# Altium integrated library conn_wire2board.IntLib: 234 symbols (part 2 of 2)
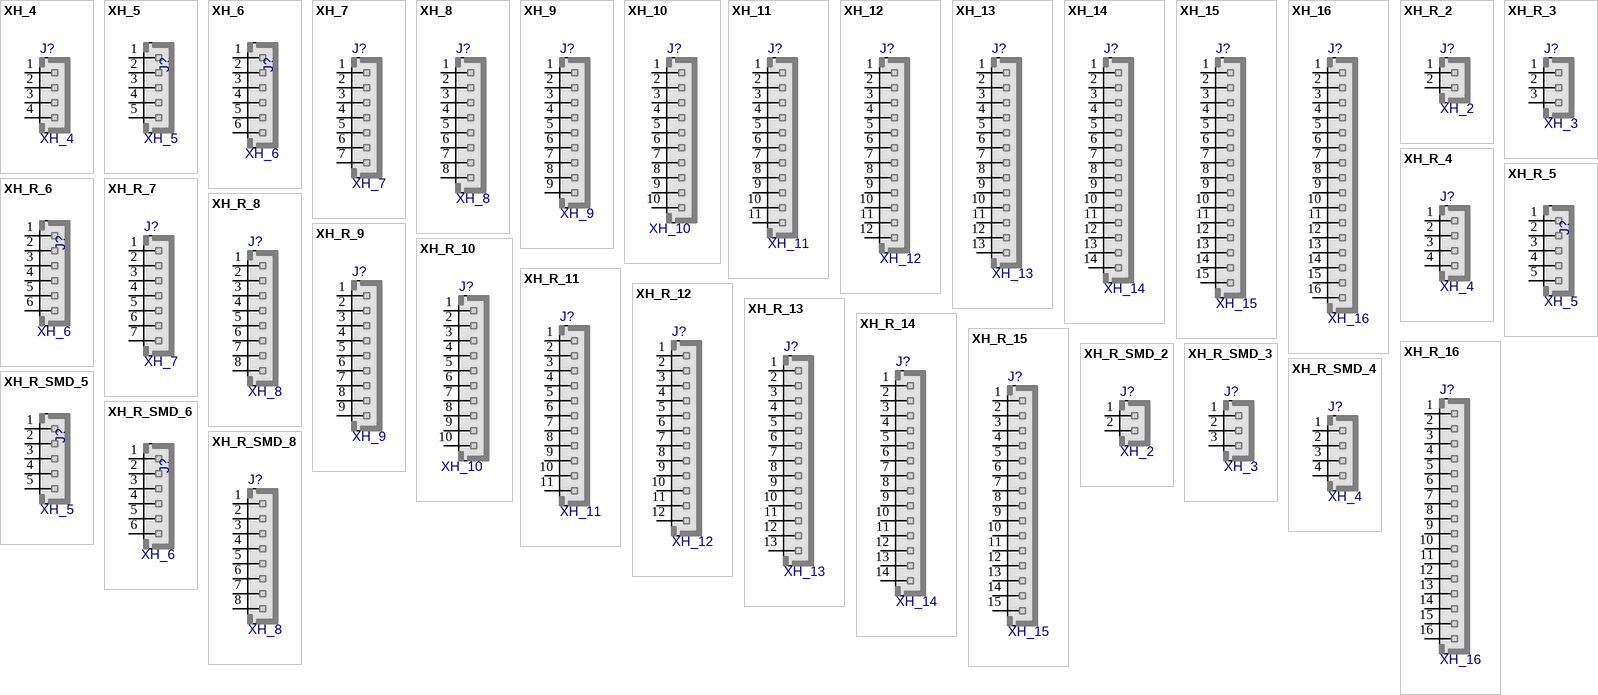
[diagram p6: symbols XH_4 to XH_R_SMD_8]

## XH_9
designator J?
PW10-x-M, JST-BxB-XH-A pitch: 2.5mm, 3A/250v; MANF: JST; MANF_P#: B9B-XH-A; PARAM2: 250v; PARAM: 3.0A; VALUE: XH_9
footprint XH_9 (PW10-xx-M, JST-BxB-XH-A pitch: 2.5mm)
pins: 1, 2, 3, 4, 5, 6, 7, 8, 9

## XH_10
designator J?
PW10-x-M, JST-BxB-XH-A pitch: 2.5mm, 3A/250v; MANF: JST; MANF_P#: B10B-XH-A; PARAM2: 250v; PARAM: 3.0A; VALUE: XH_10
footprint XH_10 (PW10-xx-M, JST-BxB-XH-A pitch: 2.5mm)
pins: 1, 2, 3, 4, 5, 6, 7, 8, 9, 10

## XH_11
designator J?
PW10-x-M, JST-BxB-XH-A pitch: 2.5mm, 3A/250v; MANF: JST; MANF_P#: B11B-XH-A; PARAM2: 250v; PARAM: 3.0A; VALUE: XH_11
footprint XH_11 (PW10-x-M, JST-BxB-XH-A pitch: 2.5mm, 3A/250v)
pins: 1, 2, 3, 4, 5, 6, 7, 8, 9, 10, 11

## XH_12
designator J?
PW10-x-M, JST-BxB-XH-A pitch: 2.5mm, 3A/250v; MANF: JST; MANF_P#: B12B-XH-A; PARAM2: 250v; PARAM: 3.0A; VALUE: XH_12
footprint XH_12 (PW10-x-M, JST-BxB-XH-A pitch: 2.5mm, 3A/250v)
pins: 1, 2, 3, 4, 5, 6, 7, 8, 9, 10, 11, 12

## XH_13
designator J?
PW10-x-M, JST-BxB-XH-A pitch: 2.5mm, 3A/250v; MANF: JST; MANF_P#: B13B-XH-A; PARAM2: 250v; PARAM: 3.0A; VALUE: XH_13
footprint XH_13 (PW10-x-M, JST-BxB-XH-A pitch: 2.5mm, 3A/250v)
pins: 1, 2, 3, 4, 5, 6, 7, 8, 9, 10, 11, 12, 13

## XH_14
designator J?
PW10-x-M, JST-BxB-XH-A pitch: 2.5mm, 3A/250v; MANF: JST; MANF_P#: B14B-XH-A; PARAM2: 250v; PARAM: 3.0A; VALUE: XH_14
footprint XH_14 (PW10-x-M, JST-BxB-XH-A pitch: 2.5mm, 3A/250v)
pins: 1, 2, 3, 4, 5, 6, 7, 8, 9, 10, 11, 12, 13, 14

## XH_15
designator J?
PW10-x-M, JST-BxB-XH-A pitch: 2.5mm, 3A/250v; MANF: JST; MANF_P#: B15B-XH-A; PARAM2: 250v; PARAM: 3.0A; VALUE: XH_15
footprint XH_15 (PW10-x-M, JST-BxB-XH-A pitch: 2.5mm, 3A/250v)
pins: 1, 2, 3, 4, 5, 6, 7, 8, 9, 10, 11, 12, 13, 14, 15

## XH_16
designator J?
PW10-x-M, JST-BxB-XH-A pitch: 2.5mm, 3A/250v; MANF: JST; MANF_P#: B16B-XH-A; PARAM2: 250v; PARAM: 3.0A; VALUE: XH_16
footprint XH_16 (PW10-x-M, JST-BxB-XH-A pitch: 2.5mm, 3A/250v)
pins: 1, 2, 3, 4, 5, 6, 7, 8, 9, 10, 11, 12, 13, 14, 15, 16

## XH_R_2
designator J?, comment XH_2
JST-SxB-XH-A pitch: 2.5mm, 3A/250v; MANF: JST; MANF_P#: S2B-XH-A; PARAM2: 250v; PARAM: 3.0A; VALUE: XH_2
footprint XH_R_2 (JST-SxB-XH-A pitch: 2.5mm, 3A/250v, Righ Angle (Side Entry))
pins: 1, 2

## XH_R_3
designator J?, comment XH_3
JST-SxB-XH-A pitch: 2.5mm, 3A/250v; MANF: JST; MANF_P#: S3B-XH-A; PARAM2: 250v; PARAM: 3.0A; VALUE: XH_3
footprint XH_R_3 (JST-SxB-XH-A pitch: 2.5mm, 3A/250v, Righ Angle (Side Entry))
pins: 1, 2, 3

## XH_R_4
designator J?, comment XH_4
JST-SxB-XH-A pitch: 2.5mm, 3A/250v; MANF: JST; MANF_P#: S4B-XH-A; PARAM2: 250v; PARAM: 3.0A; VALUE: XH_4
footprint XH_R_4 (JST-SxB-XH-A pitch: 2.5mm, 3A/250v, Righ Angle (Side Entry))
pins: 1, 2, 3, 4

## XH_R_5
designator J?, comment XH_5
JST-SxB-XH-A pitch: 2.5mm, 3A/250v; MANF: JST; PARAM2: 250v; PARAM: 3.0A; MANF_P#: S5B-XH-A; VALUE: XH_5
footprint XH_R_5 (JST-SxB-XH-A pitch: 2.5mm, 3A/250v, Righ Angle (Side Entry))
pins: 1, 2, 3, 4, 5

## XH_R_6
designator J?, comment XH_6
JST-SxB-XH-A pitch: 2.5mm, 3A/250v; MANF: JST; PARAM2: 250v; PARAM: 3.0A; MANF_P#: S6B-XH-A; VALUE: XH_6
footprint XH_R_6 (JST-SxB-XH-A pitch: 2.5mm, 3A/250v, Righ Angle (Side Entry))
pins: 1, 2, 3, 4, 5, 6

## XH_R_7
designator J?, comment XH_7
JST-SxB-XH-A pitch: 2.5mm, 3A/250v; MANF: JST; MANF_P#: S7B-XH-A; PARAM2: 250v; PARAM: 3.0A; VALUE: XH_7
footprint XH_R_7 (JST-SxB-XH-A pitch: 2.5mm, 3A/250v, Righ Angle (Side Entry))
pins: 1, 2, 3, 4, 5, 6, 7

## XH_R_8
designator J?, comment XH_8
JST-SxB-XH-A pitch: 2.5mm, 3A/250v; MANF: JST; MANF_P#: S8B-XH-A; PARAM2: 250v; PARAM: 3.0A; VALUE: XH_8
footprint XH_R_8 (JST-SxB-XH-A pitch: 2.5mm, 3A/250v, Righ Angle (Side Entry))
pins: 1, 2, 3, 4, 5, 6, 7, 8

## XH_R_9
designator J?, comment XH_9
JST-SxB-XH-A pitch: 2.5mm, 3A/250v; MANF: JST; MANF_P#: S9B-XH-A; PARAM2: 250v; PARAM: 3.0A; VALUE: XH_9
footprint XH_R_9 (JST-SxB-XH-A pitch: 2.5mm, 3A/250v, Righ Angle (Side Entry))
pins: 1, 2, 3, 4, 5, 6, 7, 8, 9

## XH_R_10
designator J?, comment XH_10
JST-SxB-XH-A pitch: 2.5mm, 3A/250v; MANF: JST; MANF_P#: S10B-XH-A; PARAM2: 250v; PARAM: 3.0A; VALUE: XH_10
footprint XH_R_10 (JST-SxB-XH-A pitch: 2.5mm, 3A/250v, Righ Angle (Side Entry))
pins: 1, 2, 3, 4, 5, 6, 7, 8, 9, 10

## XH_R_11
designator J?, comment XH_11
JST-SxB-XH-A pitch: 2.5mm, 3A/250v; MANF: JST; MANF_P#: S11B-XH-A; PARAM2: 250v; PARAM: 3.0A; VALUE: XH_11
footprint XH_R_11 (JST-SxB-XH-A pitch: 2.5mm, 3A/250v, Righ Angle (Side Entry))
pins: 1, 2, 3, 4, 5, 6, 7, 8, 9, 10, 11

## XH_R_12
designator J?, comment XH_12
JST-SxB-XH-A pitch: 2.5mm, 3A/250v; MANF: JST; MANF_P#: S12B-XH-A; PARAM2: 250v; PARAM: 3.0A; VALUE: XH_12
footprint XH_R_12 (JST-SxB-XH-A pitch: 2.5mm, 3A/250v, Righ Angle (Side Entry))
pins: 1, 2, 3, 4, 5, 6, 7, 8, 9, 10, 11, 12

## XH_R_13
designator J?, comment XH_13
JST-SxB-XH-A pitch: 2.5mm, 3A/250v; MANF: JST; MANF_P#: S13B-XH-A; PARAM2: 250v; PARAM: 3.0A; VALUE: XH_13
footprint XH_R_13 (JST-SxB-XH-A pitch: 2.5mm, 3A/250v, Righ Angle (Side Entry))
pins: 1, 2, 3, 4, 5, 6, 7, 8, 9, 10, 11, 12, 13

## XH_R_14
designator J?, comment XH_14
JST-SxB-XH-A pitch: 2.5mm, 3A/250v; MANF: JST; MANF_P#: S14B-XH-A; PARAM2: 250v; PARAM: 3.0A; VALUE: XH_14
footprint XH_R_14 (JST-SxB-XH-A pitch: 2.5mm, 3A/250v, Righ Angle (Side Entry))
pins: 1, 2, 3, 4, 5, 6, 7, 8, 9, 10, 11, 12, 13, 14

## XH_R_15
designator J?, comment XH_15
JST-SxB-XH-A pitch: 2.5mm, 3A/250v; MANF: JST; MANF_P#: S15B-XH-A; PARAM2: 250v; PARAM: 3.0A; VALUE: XH_15
footprint XH_R_15 (JST-SxB-XH-A pitch: 2.5mm, 3A/250v, Righ Angle (Side Entry))
pins: 1, 2, 3, 4, 5, 6, 7, 8, 9, 10, 11, 12, 13, 14, 15

## XH_R_16
designator J?, comment XH_16
JST-SxB-XH-A pitch: 2.5mm, 3A/250v; MANF: JST; MANF_P#: S16B-XH-A; PARAM2: 250v; PARAM: 3.0A; VALUE: XH_16
footprint XH_R_16 (JST-SxB-XH-A pitch: 2.5mm, 3A/250v, Righ Angle (Side Entry))
pins: 1, 2, 3, 4, 5, 6, 7, 8, 9, 10, 11, 12, 13, 14, 15, 16

## XH_R_SMD_2
designator J?, comment XH_2
JST-SxB-XH-SM4 pitch: 2.5mm, 3A/250v; MANF: JST; MANF_P#: S2B-XH-A; PARAM2: 250v; PARAM: 3.0A; VALUE: XH_2
footprint XH_R_SMD_2 (JST-SxB-XH-SM4-TB pitch: 2.5mm, 3A/250v, Righ Angle (Side Entry), SMD)
pins: 1, 2

## XH_R_SMD_3
designator J?, comment XH_3
JST-SxB-XH-SM4 pitch: 2.5mm, 3A/250v; MANF: JST; MANF_P#: S3B-XH-A; PARAM2: 250v; PARAM: 3.0A; VALUE: XH_3
footprint XH_R_SMD_3 (JST-SxB-XH-SM4-TB pitch: 2.5mm, 3A/250v, Righ Angle (Side Entry), SMD)
pins: 1, 2, 3

## XH_R_SMD_4
designator J?, comment XH_4
JST-SxB-XH-SM4 pitch: 2.5mm, 3A/250v; MANF: JST; MANF_P#: S4B-XH-A; PARAM2: 250v; PARAM: 3.0A; VALUE: XH_4
footprint XH_R_SMD_4 (JST-SxB-XH-SM4-TB pitch: 2.5mm, 3A/250v, Righ Angle (Side Entry), SMD)
pins: 1, 2, 3, 4

## XH_R_SMD_5
designator J?, comment XH_5
JST-SxB-XH-SM4 pitch: 2.5mm, 3A/250v; MANF: JST; PARAM2: 250v; PARAM: 3.0A; MANF_P#: S5B-XH-A; VALUE: XH_5
footprint XH_R_SMD_5 (JST-SxB-XH-SM4-TB pitch: 2.5mm, 3A/250v, Righ Angle (Side Entry), SMD)
pins: 1, 2, 3, 4, 5

## XH_R_SMD_6
designator J?, comment XH_6
JST-SxB-XH-SM4 pitch: 2.5mm, 3A/250v; MANF: JST; PARAM2: 250v; PARAM: 3.0A; MANF_P#: S6B-XH-A; VALUE: XH_6
footprint XH_R_SMD_6 (JST-SxB-XH-SM4-TB pitch: 2.5mm, 3A/250v, Righ Angle (Side Entry), SMD)
pins: 1, 2, 3, 4, 5, 6

## XH_R_SMD_8
designator J?, comment XH_8
JST-SxB-XH-SM4 pitch: 2.5mm, 3A/250v; MANF: JST; MANF_P#: S8B-XH-A; PARAM2: 250v; PARAM: 3.0A; VALUE: XH_8
footprint XH_R_SMD_8 (JST-SxB-XH-SM4-TB pitch: 2.5mm, 3A/250v, Righ Angle (Side Entry), SMD)
pins: 1, 2, 3, 4, 5, 6, 7, 8